# Altium schematic symbol library Altium_Library.SchLib: 822 symbols (part 16 of 17)
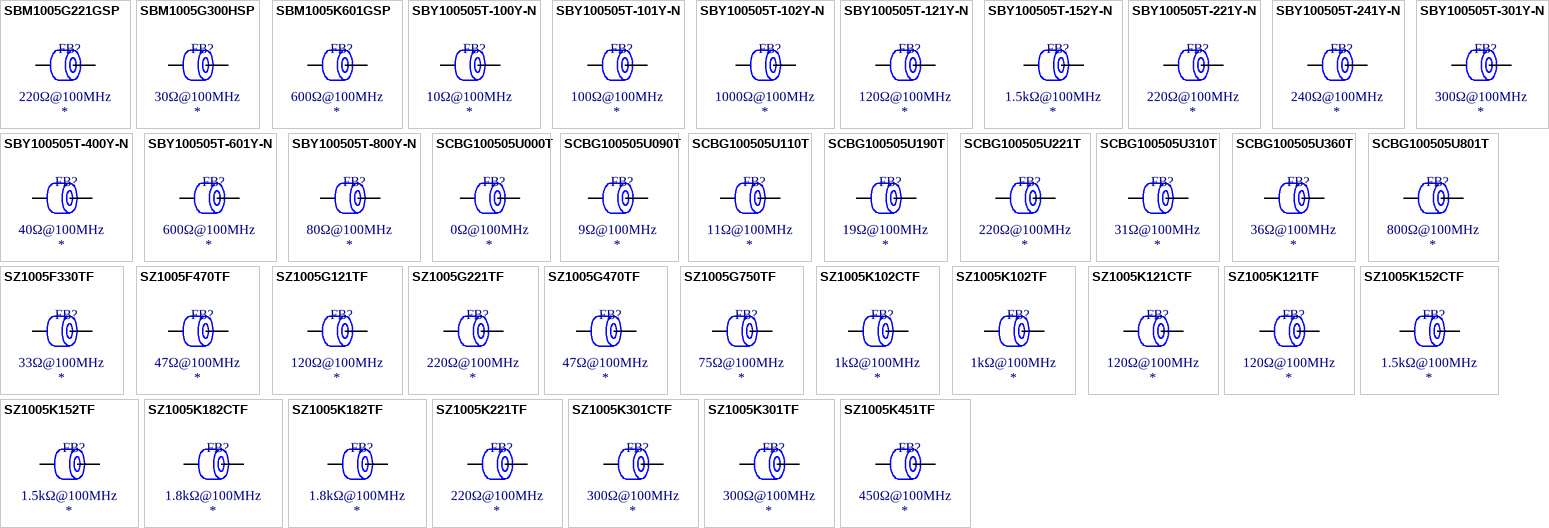
[diagram p35: symbols SBM1005G221GSP to SZ1005K451TF]

## SBM1005G300HSP
designator FB?  Impedance @ Frequency: 30Ω@100MHz
Ferrite, 30Ω@100MHz, ±25%, 150mΩ, 600mA, SMD 0402; Manufacturer: Sunltech Tech; Manufacturer Part Number: SBM1005G300HSP; Package Size: 0402; JLCPCB Basic Part: No; JLCPCB Part Number: C216123; Supplier 1: LCSC; Category: Ferrite Beads; Supplier Part Number 1: C216123; Tolerance: ±25%; Rated Current: 600mA; DC Resistance: 150mΩ; RoHS: Yes; ComponentLink1Description: Datasheet; ComponentLink1URL: https://wmsc.lcsc.com/wmsc/upload/file/pdf/v2/lcsc/2304140030_Sunltech-Tech-SBM1005G300HSP_C216123.pdf; ComponentLink2Description: JLCPCB Part URL; ComponentLink2URL: https://jlcpcb.com/partdetail/C216123; ComponentLink3Description: LCSC Part URL; ComponentLink3URL: https://lcsc.com/product-detail/Ferrite-Beads_Sunltech-Tech-Sunltech-Tech-SBM1005G300HSP_C216123.html
footprint FB-0402 (0402 (1005M) Ferrite)
pins: 1, 2

## SBM1005K601GSP
designator FB?  Impedance @ Frequency: 600Ω@100MHz
Ferrite, 600Ω@100MHz, ±25%, 1Ω, 500mA, SMD 0402; Manufacturer: Sunltech Tech; Manufacturer Part Number: SBM1005K601GSP; Package Size: 0402; JLCPCB Basic Part: No; JLCPCB Part Number: C216127; Supplier 1: LCSC; Category: Ferrite Beads; Supplier Part Number 1: C216127; Tolerance: ±25%; Rated Current: 500mA; DC Resistance: 1Ω; RoHS: Yes; ComponentLink1Description: Datasheet; ComponentLink1URL: https://wmsc.lcsc.com/wmsc/upload/file/pdf/v2/lcsc/2304140030_Sunltech-Tech-SBM1005K601GSP_C216127.pdf; ComponentLink2Description: JLCPCB Part URL; ComponentLink2URL: https://jlcpcb.com/partdetail/C216127; ComponentLink3Description: LCSC Part URL; ComponentLink3URL: https://lcsc.com/product-detail/Ferrite-Beads_Sunltech-Tech-Sunltech-Tech-SBM1005K601GSP_C216127.html
footprint FB-0402 (0402 (1005M) Ferrite)
pins: 1, 2

## SBY100505T-100Y-N
designator FB?  Impedance @ Frequency: 10Ω@100MHz
Ferrite, 10Ω@100MHz, ±25%, 0.05Ω, 500mA, SMD 0402; Manufacturer: Chilisin Elec; Manufacturer Part Number: SBY100505T-100Y-N; Package Size: 0402; JLCPCB Basic Part: No; JLCPCB Part Number: C285645; Supplier 1: LCSC; Category: Ferrite Beads; Supplier Part Number 1: C285645; Tolerance: ±25%; Rated Current: 500mA; DC Resistance: 0.05Ω; RoHS: Yes; ComponentLink1Description: Datasheet; ComponentLink1URL: https://wmsc.lcsc.com/wmsc/upload/file/pdf/v2/lcsc/2304140030_Chilisin-Elec-SBY100505T-100Y-N_C285645.pdf; ComponentLink2Description: JLCPCB Part URL; ComponentLink2URL: https://jlcpcb.com/partdetail/C285645; ComponentLink3Description: LCSC Part URL; ComponentLink3URL: https://lcsc.com/product-detail/Ferrite-Beads_Chilisin-Elec-Chilisin-Elec-SBY100505T-100Y-N_C285645.html
footprint FB-0402 (0402 (1005M) Ferrite)
pins: 1, 2

## SBY100505T-101Y-N
designator FB?  Impedance @ Frequency: 100Ω@100MHz
Ferrite, 100Ω@100MHz, ±25%, 0.25Ω, 500mA, SMD 0402; Manufacturer: Chilisin Elec; Manufacturer Part Number: SBY100505T-101Y-N; Package Size: 0402; JLCPCB Basic Part: No; JLCPCB Part Number: C280601; Supplier 1: LCSC; Category: Ferrite Beads; Supplier Part Number 1: C280601; Tolerance: ±25%; Rated Current: 500mA; DC Resistance: 0.25Ω; RoHS: Yes; ComponentLink1Description: Datasheet; ComponentLink1URL: https://wmsc.lcsc.com/wmsc/upload/file/pdf/v2/lcsc/2304140030_Chilisin-Elec-SBY100505T-101Y-N_C280601.pdf; ComponentLink2Description: JLCPCB Part URL; ComponentLink2URL: https://jlcpcb.com/partdetail/C280601; ComponentLink3Description: LCSC Part URL; ComponentLink3URL: https://lcsc.com/product-detail/Ferrite-Beads_Chilisin-Elec-Chilisin-Elec-SBY100505T-101Y-N_C280601.html
footprint FB-0402 (0402 (1005M) Ferrite)
pins: 1, 2

## SBY100505T-102Y-N
designator FB?  Impedance @ Frequency: 1000Ω@100MHz
Ferrite, 1000Ω@100MHz, ±25%, 0.65Ω, 300mA, SMD 0402; Manufacturer: Chilisin Elec; Manufacturer Part Number: SBY100505T-102Y-N; Package Size: 0402; JLCPCB Basic Part: No; JLCPCB Part Number: C280602; Supplier 1: LCSC; Category: Ferrite Beads; Supplier Part Number 1: C280602; Tolerance: ±25%; Rated Current: 300mA; DC Resistance: 0.65Ω; RoHS: Yes; ComponentLink1Description: Datasheet; ComponentLink1URL: https://wmsc.lcsc.com/wmsc/upload/file/pdf/v2/lcsc/1811141623_Chilisin-Elec-SBY100505T-102Y-N_C280602.pdf; ComponentLink2Description: JLCPCB Part URL; ComponentLink2URL: https://jlcpcb.com/partdetail/C280602; ComponentLink3Description: LCSC Part URL; ComponentLink3URL: https://lcsc.com/product-detail/Ferrite-Beads_Chilisin-Elec-Chilisin-Elec-SBY100505T-102Y-N_C280602.html
footprint FB-0402 (0402 (1005M) Ferrite)
pins: 1, 2

## SBY100505T-121Y-N
designator FB?  Impedance @ Frequency: 120Ω@100MHz
Ferrite, 120Ω@100MHz, ±25%, 0.25Ω, 500mA, SMD 0402; Manufacturer: Chilisin Elec; Manufacturer Part Number: SBY100505T-121Y-N; Package Size: 0402; JLCPCB Basic Part: No; JLCPCB Part Number: C142034; Supplier 1: LCSC; Category: Ferrite Beads; Supplier Part Number 1: C142034; Tolerance: ±25%; Rated Current: 500mA; DC Resistance: 0.25Ω; RoHS: Yes; ComponentLink1Description: Datasheet; ComponentLink1URL: https://wmsc.lcsc.com/wmsc/upload/file/pdf/v2/lcsc/2304140030_Chilisin-Elec-SBY100505T-121Y-N_C142034.pdf; ComponentLink2Description: JLCPCB Part URL; ComponentLink2URL: https://jlcpcb.com/partdetail/C142034; ComponentLink3Description: LCSC Part URL; ComponentLink3URL: https://lcsc.com/product-detail/Ferrite-Beads_Chilisin-Elec-Chilisin-Elec-SBY100505T-121Y-N_C142034.html
footprint FB-0402 (0402 (1005M) Ferrite)
pins: 1, 2

## SBY100505T-152Y-N
designator FB?  Impedance @ Frequency: 1.5kΩ@100MHz
Ferrite, 1.5kΩ@100MHz, ±25%, SMD 0402; Manufacturer: Chilisin Elec; Manufacturer Part Number: SBY100505T-152Y-N; Package Size: 0402; JLCPCB Basic Part: No; JLCPCB Part Number: C142033; Supplier 1: LCSC; Category: Ferrite Beads; Supplier Part Number 1: C142033; Tolerance: ±25%; RoHS: Yes; ComponentLink1Description: Datasheet; ComponentLink1URL: https://wmsc.lcsc.com/wmsc/upload/file/pdf/v2/lcsc/2304140030_Chilisin-Elec-SBY100505T-152Y-N_C142033.pdf; ComponentLink2Description: JLCPCB Part URL; ComponentLink2URL: https://jlcpcb.com/partdetail/C142033; ComponentLink3Description: LCSC Part URL; ComponentLink3URL: https://lcsc.com/product-detail/Ferrite-Beads_Chilisin-Elec-Chilisin-Elec-SBY100505T-152Y-N_C142033.html
footprint FB-0402 (0402 (1005M) Ferrite)
pins: 1, 2

## SBY100505T-221Y-N
designator FB?  Impedance @ Frequency: 220Ω@100MHz
Ferrite, 220Ω@100MHz, ±25%, 0.29Ω, 450mA, SMD 0402; Manufacturer: Chilisin Elec; Manufacturer Part Number: SBY100505T-221Y-N; Package Size: 0402; JLCPCB Basic Part: No; JLCPCB Part Number: C108307; Supplier 1: LCSC; Category: Ferrite Beads; Supplier Part Number 1: C108307; Tolerance: ±25%; Rated Current: 450mA; DC Resistance: 0.29Ω; RoHS: Yes; ComponentLink1Description: Datasheet; ComponentLink1URL: https://wmsc.lcsc.com/wmsc/upload/file/pdf/v2/lcsc/2304140030_Chilisin-Elec-SBY100505T-221Y-N_C108307.pdf; ComponentLink2Description: JLCPCB Part URL; ComponentLink2URL: https://jlcpcb.com/partdetail/C108307; ComponentLink3Description: LCSC Part URL; ComponentLink3URL: https://lcsc.com/product-detail/Ferrite-Beads_Chilisin-Elec-Chilisin-Elec-SBY100505T-221Y-N_C108307.html
footprint FB-0402 (0402 (1005M) Ferrite)
pins: 1, 2

## SBY100505T-241Y-N
designator FB?  Impedance @ Frequency: 240Ω@100MHz
Ferrite, 240Ω@100MHz, ±25%, 0.4Ω, 400mA, SMD 0402; Manufacturer: Chilisin Elec; Manufacturer Part Number: SBY100505T-241Y-N; Package Size: 0402; JLCPCB Basic Part: No; JLCPCB Part Number: C329646; Supplier 1: LCSC; Category: Ferrite Beads; Supplier Part Number 1: C329646; Tolerance: ±25%; Rated Current: 400mA; DC Resistance: 0.4Ω; RoHS: Yes; ComponentLink1Description: Datasheet; ComponentLink1URL: https://wmsc.lcsc.com/wmsc/upload/file/pdf/v2/lcsc/1912111437_Chilisin-Elec-SBY100505T-241Y-N_C329646.pdf; ComponentLink2Description: JLCPCB Part URL; ComponentLink2URL: https://jlcpcb.com/partdetail/C329646; ComponentLink3Description: LCSC Part URL; ComponentLink3URL: https://lcsc.com/product-detail/Ferrite-Beads_Chilisin-Elec-Chilisin-Elec-SBY100505T-241Y-N_C329646.html
footprint FB-0402 (0402 (1005M) Ferrite)
pins: 1, 2

## SBY100505T-301Y-N
designator FB?  Impedance @ Frequency: 300Ω@100MHz
Ferrite, 300Ω@100MHz, ±25%, 0.5Ω, 300mA, SMD 0402; Manufacturer: Chilisin Elec; Manufacturer Part Number: SBY100505T-301Y-N; Package Size: 0402; JLCPCB Basic Part: No; JLCPCB Part Number: C108308; Supplier 1: LCSC; Category: Ferrite Beads; Supplier Part Number 1: C108308; Tolerance: ±25%; Rated Current: 300mA; DC Resistance: 0.5Ω; RoHS: Yes; ComponentLink1Description: Datasheet; ComponentLink1URL: https://wmsc.lcsc.com/wmsc/upload/file/pdf/v2/lcsc/2304140030_Chilisin-Elec-SBY100505T-301Y-N_C108308.pdf; ComponentLink2Description: JLCPCB Part URL; ComponentLink2URL: https://jlcpcb.com/partdetail/C108308; ComponentLink3Description: LCSC Part URL; ComponentLink3URL: https://lcsc.com/product-detail/Ferrite-Beads_Chilisin-Elec-Chilisin-Elec-SBY100505T-301Y-N_C108308.html
footprint FB-0402 (0402 (1005M) Ferrite)
pins: 1, 2

## SBY100505T-400Y-N
designator FB?  Impedance @ Frequency: 40Ω@100MHz
Ferrite, 40Ω@100MHz, ±25%, 0.2Ω, 500mA, SMD 0402; Manufacturer: Chilisin Elec; Manufacturer Part Number: SBY100505T-400Y-N; Package Size: 0402; JLCPCB Basic Part: No; JLCPCB Part Number: C285643; Supplier 1: LCSC; Category: Ferrite Beads; Supplier Part Number 1: C285643; Tolerance: ±25%; Rated Current: 500mA; DC Resistance: 0.2Ω; RoHS: Yes; ComponentLink1Description: Datasheet; ComponentLink1URL: https://wmsc.lcsc.com/wmsc/upload/file/pdf/v2/lcsc/2304140030_Chilisin-Elec-SBY100505T-400Y-N_C285643.pdf; ComponentLink2Description: JLCPCB Part URL; ComponentLink2URL: https://jlcpcb.com/partdetail/C285643; ComponentLink3Description: LCSC Part URL; ComponentLink3URL: https://lcsc.com/product-detail/Ferrite-Beads_Chilisin-Elec-Chilisin-Elec-SBY100505T-400Y-N_C285643.html
footprint FB-0402 (0402 (1005M) Ferrite)
pins: 1, 2

## SBY100505T-601Y-N
designator FB?  Impedance @ Frequency: 600Ω@100MHz
Ferrite, 600Ω@100MHz, ±25%, 0.52Ω, 300mA, SMD 0402; Manufacturer: Chilisin Elec; Manufacturer Part Number: SBY100505T-601Y-N; Package Size: 0402; JLCPCB Basic Part: No; JLCPCB Part Number: C142031; Supplier 1: LCSC; Category: Ferrite Beads; Supplier Part Number 1: C142031; Tolerance: ±25%; Rated Current: 300mA; DC Resistance: 0.52Ω; RoHS: Yes; ComponentLink1Description: Datasheet; ComponentLink1URL: https://wmsc.lcsc.com/wmsc/upload/file/pdf/v2/lcsc/2304140030_Chilisin-Elec-SBY100505T-601Y-N_C142031.pdf; ComponentLink2Description: JLCPCB Part URL; ComponentLink2URL: https://jlcpcb.com/partdetail/C142031; ComponentLink3Description: LCSC Part URL; ComponentLink3URL: https://lcsc.com/product-detail/Ferrite-Beads_Chilisin-Elec-Chilisin-Elec-SBY100505T-601Y-N_C142031.html
footprint FB-0402 (0402 (1005M) Ferrite)
pins: 1, 2

## SBY100505T-800Y-N
designator FB?  Impedance @ Frequency: 80Ω@100MHz
Ferrite, 80Ω@100MHz, ±25%, 0.2Ω, 500mA, SMD 0402; Manufacturer: Chilisin Elec; Manufacturer Part Number: SBY100505T-800Y-N; Package Size: 0402; JLCPCB Basic Part: No; JLCPCB Part Number: C2913982; Supplier 1: LCSC; Category: Ferrite Beads; Supplier Part Number 1: C2913982; Tolerance: ±25%; Rated Current: 500mA; DC Resistance: 0.2Ω; RoHS: Yes; ComponentLink1Description: Datasheet; ComponentLink1URL: https://wmsc.lcsc.com/wmsc/upload/file/pdf/v2/lcsc/2111051730_Chilisin-Elec-SBY100505T-800Y-N_C2913982.pdf; ComponentLink2Description: JLCPCB Part URL; ComponentLink2URL: https://jlcpcb.com/partdetail/C2913982; ComponentLink3Description: LCSC Part URL; ComponentLink3URL: https://lcsc.com/product-detail/Ferrite-Beads_Chilisin-Elec-Chilisin-Elec-SBY100505T-800Y-N_C2913982.html
footprint FB-0402 (0402 (1005M) Ferrite)
pins: 1, 2

## SCBG100505U000T
designator FB?  Impedance @ Frequency: 0Ω@100MHz
Ferrite, 0Ω@100MHz, 100mΩ, 300mA, SMD 0402; Manufacturer: Yanchuang; Manufacturer Part Number: SCBG100505U000T; Package Size: 0402; JLCPCB Basic Part: No; JLCPCB Part Number: C480820; Supplier 1: LCSC; Category: Ferrite Beads; Supplier Part Number 1: C480820; Rated Current: 300mA; DC Resistance: 100mΩ; RoHS: Yes; ComponentLink1Description: Datasheet; ComponentLink1URL: https://wmsc.lcsc.com/wmsc/upload/file/pdf/v2/lcsc/2304140030_Yanchuang-SCBG100505U000T_C480820.pdf; ComponentLink2Description: JLCPCB Part URL; ComponentLink2URL: https://jlcpcb.com/partdetail/C480820; ComponentLink3Description: LCSC Part URL; ComponentLink3URL: https://lcsc.com/product-detail/Ferrite-Beads_Yanchuang-Yanchuang-SCBG100505U000T_C480820.html
footprint FB-0402 (0402 (1005M) Ferrite)
pins: 1, 2

## SCBG100505U090T
designator FB?  Impedance @ Frequency: 9Ω@100MHz
Ferrite, 9Ω@100MHz, 100mΩ, 300mA, SMD 0402; Manufacturer: Yanchuang; Manufacturer Part Number: SCBG100505U090T; Package Size: 0402; JLCPCB Basic Part: No; JLCPCB Part Number: C480823; Supplier 1: LCSC; Category: Ferrite Beads; Supplier Part Number 1: C480823; Rated Current: 300mA; DC Resistance: 100mΩ; RoHS: Yes; ComponentLink1Description: Datasheet; ComponentLink1URL: https://wmsc.lcsc.com/wmsc/upload/file/pdf/v2/lcsc/2304140030_Yanchuang-SCBG100505U090T_C480823.pdf; ComponentLink2Description: JLCPCB Part URL; ComponentLink2URL: https://jlcpcb.com/partdetail/C480823; ComponentLink3Description: LCSC Part URL; ComponentLink3URL: https://lcsc.com/product-detail/Ferrite-Beads_Yanchuang-Yanchuang-SCBG100505U090T_C480823.html
footprint FB-0402 (0402 (1005M) Ferrite)
pins: 1, 2

## SCBG100505U110T
designator FB?  Impedance @ Frequency: 11Ω@100MHz
Ferrite, 11Ω@100MHz, 100mΩ, 300mA, SMD 0402; Manufacturer: Yanchuang; Manufacturer Part Number: SCBG100505U110T; Package Size: 0402; JLCPCB Basic Part: No; JLCPCB Part Number: C480824; Supplier 1: LCSC; Category: Ferrite Beads; Supplier Part Number 1: C480824; Rated Current: 300mA; DC Resistance: 100mΩ; RoHS: Yes; ComponentLink1Description: Datasheet; ComponentLink1URL: https://wmsc.lcsc.com/wmsc/upload/file/pdf/v2/lcsc/2304140030_Yanchuang-SCBG100505U110T_C480824.pdf; ComponentLink2Description: JLCPCB Part URL; ComponentLink2URL: https://jlcpcb.com/partdetail/C480824; ComponentLink3Description: LCSC Part URL; ComponentLink3URL: https://lcsc.com/product-detail/Ferrite-Beads_Yanchuang-Yanchuang-SCBG100505U110T_C480824.html
footprint FB-0402 (0402 (1005M) Ferrite)
pins: 1, 2

## SCBG100505U190T
designator FB?  Impedance @ Frequency: 19Ω@100MHz
Ferrite, 19Ω@100MHz, 100mΩ, 300mA, SMD 0402; Manufacturer: Yanchuang; Manufacturer Part Number: SCBG100505U190T; Package Size: 0402; JLCPCB Basic Part: No; JLCPCB Part Number: C480826; Supplier 1: LCSC; Category: Ferrite Beads; Supplier Part Number 1: C480826; Rated Current: 300mA; DC Resistance: 100mΩ; RoHS: Yes; ComponentLink1Description: Datasheet; ComponentLink1URL: https://wmsc.lcsc.com/wmsc/upload/file/pdf/v2/lcsc/2304140030_Yanchuang-SCBG100505U190T_C480826.pdf; ComponentLink2Description: JLCPCB Part URL; ComponentLink2URL: https://jlcpcb.com/partdetail/C480826; ComponentLink3Description: LCSC Part URL; ComponentLink3URL: https://lcsc.com/product-detail/Ferrite-Beads_Yanchuang-Yanchuang-SCBG100505U190T_C480826.html
footprint FB-0402 (0402 (1005M) Ferrite)
pins: 1, 2

## SCBG100505U221T
designator FB?  Impedance @ Frequency: 220Ω@100MHz
Ferrite, 220Ω@100MHz, ±25%, 700mΩ, 100mA, SMD 0402; Manufacturer: Yanchuang; Manufacturer Part Number: SCBG100505U221T; Package Size: 0402; JLCPCB Basic Part: No; JLCPCB Part Number: C480835; Supplier 1: LCSC; Category: Ferrite Beads; Supplier Part Number 1: C480835; Tolerance: ±25%; Rated Current: 100mA; DC Resistance: 700mΩ; RoHS: Yes; ComponentLink1Description: Datasheet; ComponentLink1URL: https://wmsc.lcsc.com/wmsc/upload/file/pdf/v2/lcsc/2304140030_Yanchuang-SCBG100505U221T_C480835.pdf; ComponentLink2Description: JLCPCB Part URL; ComponentLink2URL: https://jlcpcb.com/partdetail/C480835; ComponentLink3Description: LCSC Part URL; ComponentLink3URL: https://lcsc.com/product-detail/Ferrite-Beads_Yanchuang-Yanchuang-SCBG100505U221T_C480835.html
footprint FB-0402 (0402 (1005M) Ferrite)
pins: 1, 2

## SCBG100505U310T
designator FB?  Impedance @ Frequency: 31Ω@100MHz
Ferrite, 31Ω@100MHz, ±25%, 200mΩ, 300mA, SMD 0402; Manufacturer: Yanchuang; Manufacturer Part Number: SCBG100505U310T; Package Size: 0402; JLCPCB Basic Part: No; JLCPCB Part Number: C480828; Supplier 1: LCSC; Category: Ferrite Beads; Supplier Part Number 1: C480828; Tolerance: ±25%; Rated Current: 300mA; DC Resistance: 200mΩ; RoHS: Yes; ComponentLink1Description: Datasheet; ComponentLink1URL: https://wmsc.lcsc.com/wmsc/upload/file/pdf/v2/lcsc/2304140030_Yanchuang-SCBG100505U310T_C480828.pdf; ComponentLink2Description: JLCPCB Part URL; ComponentLink2URL: https://jlcpcb.com/partdetail/C480828; ComponentLink3Description: LCSC Part URL; ComponentLink3URL: https://lcsc.com/product-detail/Ferrite-Beads_Yanchuang-Yanchuang-SCBG100505U310T_C480828.html
footprint FB-0402 (0402 (1005M) Ferrite)
pins: 1, 2

## SCBG100505U360T
designator FB?  Impedance @ Frequency: 36Ω@100MHz
Ferrite, 36Ω@100MHz, ±25%, 200mΩ, 300mA, SMD 0402; Manufacturer: Yanchuang; Manufacturer Part Number: SCBG100505U360T; Package Size: 0402; JLCPCB Basic Part: No; JLCPCB Part Number: C480829; Supplier 1: LCSC; Category: Ferrite Beads; Supplier Part Number 1: C480829; Tolerance: ±25%; Rated Current: 300mA; DC Resistance: 200mΩ; RoHS: Yes; ComponentLink1Description: Datasheet; ComponentLink1URL: https://wmsc.lcsc.com/wmsc/upload/file/pdf/v2/lcsc/2304140030_Yanchuang-SCBG100505U360T_C480829.pdf; ComponentLink2Description: JLCPCB Part URL; ComponentLink2URL: https://jlcpcb.com/partdetail/C480829; ComponentLink3Description: LCSC Part URL; ComponentLink3URL: https://lcsc.com/product-detail/Ferrite-Beads_Yanchuang-Yanchuang-SCBG100505U360T_C480829.html
footprint FB-0402 (0402 (1005M) Ferrite)
pins: 1, 2

## SCBG100505U801T
designator FB?  Impedance @ Frequency: 800Ω@100MHz
Ferrite, 800Ω@100MHz, ±25%, 1.4Ω, 50mA, SMD 0402; Manufacturer: Yanchuang; Manufacturer Part Number: SCBG100505U801T; Package Size: 0402; JLCPCB Basic Part: No; JLCPCB Part Number: C480839; Supplier 1: LCSC; Category: Ferrite Beads; Supplier Part Number 1: C480839; Tolerance: ±25%; Rated Current: 50mA; DC Resistance: 1.4Ω; RoHS: Yes; ComponentLink1Description: Datasheet; ComponentLink1URL: https://wmsc.lcsc.com/wmsc/upload/file/pdf/v2/lcsc/2304140030_Yanchuang-SCBG100505U801T_C480839.pdf; ComponentLink2Description: JLCPCB Part URL; ComponentLink2URL: https://jlcpcb.com/partdetail/C480839; ComponentLink3Description: LCSC Part URL; ComponentLink3URL: https://lcsc.com/product-detail/Ferrite-Beads_Yanchuang-Yanchuang-SCBG100505U801T_C480839.html
footprint FB-0402 (0402 (1005M) Ferrite)
pins: 1, 2

## SZ1005F330TF
designator FB?  Impedance @ Frequency: 33Ω@100MHz
Ferrite, 33Ω@100MHz, ±25%, 400mΩ, 300mA, SMD 0402; Manufacturer: Sunlord; Manufacturer Part Number: SZ1005F330TF; Package Size: 0402; JLCPCB Basic Part: No; JLCPCB Part Number: C96979; Supplier 1: LCSC; Category: Ferrite Beads; Supplier Part Number 1: C96979; Tolerance: ±25%; Rated Current: 300mA; DC Resistance: 400mΩ; RoHS: Yes; ComponentLink1Description: Datasheet; ComponentLink1URL: https://wmsc.lcsc.com/wmsc/upload/file/pdf/v2/lcsc/2310301641_Sunlord-SZ1005F330TF_C96979.pdf; ComponentLink2Description: JLCPCB Part URL; ComponentLink2URL: https://jlcpcb.com/partdetail/C96979; ComponentLink3Description: LCSC Part URL; ComponentLink3URL: https://lcsc.com/product-detail/Ferrite-Beads_Sunlord-Sunlord-SZ1005F330TF_C96979.html
footprint FB-0402 (0402 (1005M) Ferrite)
pins: 1, 2

## SZ1005F470TF
designator FB?  Impedance @ Frequency: 47Ω@100MHz
Ferrite, 47Ω@100MHz, ±25%, 600mΩ, 200mA, SMD 0402; Manufacturer: Sunlord; Manufacturer Part Number: SZ1005F470TF; Package Size: 0402; JLCPCB Basic Part: No; JLCPCB Part Number: C92628; Supplier 1: LCSC; Category: Ferrite Beads; Supplier Part Number 1: C92628; Tolerance: ±25%; Rated Current: 200mA; DC Resistance: 600mΩ; RoHS: Yes; ComponentLink1Description: Datasheet; ComponentLink1URL: https://wmsc.lcsc.com/wmsc/upload/file/pdf/v2/lcsc/2310301641_Sunlord-SZ1005F470TF_C92628.pdf; ComponentLink2Description: JLCPCB Part URL; ComponentLink2URL: https://jlcpcb.com/partdetail/C92628; ComponentLink3Description: LCSC Part URL; ComponentLink3URL: https://lcsc.com/product-detail/Ferrite-Beads_Sunlord-Sunlord-SZ1005F470TF_C92628.html
footprint FB-0402 (0402 (1005M) Ferrite)
pins: 1, 2

## SZ1005G121TF
designator FB?  Impedance @ Frequency: 120Ω@100MHz
Ferrite, 120Ω@100MHz, ±25%, 400mΩ, 400mA, SMD 0402; Manufacturer: Sunlord; Manufacturer Part Number: SZ1005G121TF; Package Size: 0402; JLCPCB Basic Part: No; JLCPCB Part Number: C96980; Supplier 1: LCSC; Category: Ferrite Beads; Supplier Part Number 1: C96980; Tolerance: ±25%; Rated Current: 400mA; DC Resistance: 400mΩ; RoHS: Yes; ComponentLink1Description: Datasheet; ComponentLink1URL: https://wmsc.lcsc.com/wmsc/upload/file/pdf/v2/lcsc/2310301641_Sunlord-SZ1005G121TF_C96980.pdf; ComponentLink2Description: JLCPCB Part URL; ComponentLink2URL: https://jlcpcb.com/partdetail/C96980; ComponentLink3Description: LCSC Part URL; ComponentLink3URL: https://lcsc.com/product-detail/Ferrite-Beads_Sunlord-Sunlord-SZ1005G121TF_C96980.html
footprint FB-0402 (0402 (1005M) Ferrite)
pins: 1, 2

## SZ1005G221TF
designator FB?  Impedance @ Frequency: 220Ω@100MHz
Ferrite, 220Ω@100MHz, ±25%, 700mΩ, 200mA, SMD 0402; Manufacturer: Sunlord; Manufacturer Part Number: SZ1005G221TF; Package Size: 0402; JLCPCB Basic Part: No; JLCPCB Part Number: C96981; Supplier 1: LCSC; Category: Ferrite Beads; Supplier Part Number 1: C96981; Tolerance: ±25%; Rated Current: 200mA; DC Resistance: 700mΩ; RoHS: Yes; ComponentLink1Description: Datasheet; ComponentLink1URL: https://wmsc.lcsc.com/wmsc/upload/file/pdf/v2/lcsc/2310301641_Sunlord-SZ1005G221TF_C96981.pdf; ComponentLink2Description: JLCPCB Part URL; ComponentLink2URL: https://jlcpcb.com/partdetail/C96981; ComponentLink3Description: LCSC Part URL; ComponentLink3URL: https://lcsc.com/product-detail/Ferrite-Beads_Sunlord-Sunlord-SZ1005G221TF_C96981.html
footprint FB-0402 (0402 (1005M) Ferrite)
pins: 1, 2

## SZ1005G470TF
designator FB?  Impedance @ Frequency: 47Ω@100MHz
Ferrite, 47Ω@100MHz, ±25%, SMD 0402; Manufacturer: Sunlord; Manufacturer Part Number: SZ1005G470TF; Package Size: 0402; JLCPCB Basic Part: No; JLCPCB Part Number: C370546; Supplier 1: LCSC; Category: Ferrite Beads; Supplier Part Number 1: C370546; Tolerance: ±25%; RoHS: Yes; ComponentLink1Description: Datasheet; ComponentLink1URL: https://wmsc.lcsc.com/wmsc/upload/file/pdf/v2/lcsc/2310301641_Sunlord-SZ1005G470TF_C370546.pdf; ComponentLink2Description: JLCPCB Part URL; ComponentLink2URL: https://jlcpcb.com/partdetail/C370546; ComponentLink3Description: LCSC Part URL; ComponentLink3URL: https://lcsc.com/product-detail/Ferrite-Beads_Sunlord-Sunlord-SZ1005G470TF_C370546.html
footprint FB-0402 (0402 (1005M) Ferrite)
pins: 1, 2

## SZ1005G750TF
designator FB?  Impedance @ Frequency: 75Ω@100MHz
Ferrite, 75Ω@100MHz, ±25%, 300mΩ, 600mA, SMD 0402; Manufacturer: Sunlord; Manufacturer Part Number: SZ1005G750TF; Package Size: 0402; JLCPCB Basic Part: No; JLCPCB Part Number: C98274; Supplier 1: LCSC; Category: Ferrite Beads; Supplier Part Number 1: C98274; Tolerance: ±25%; Rated Current: 600mA; DC Resistance: 300mΩ; RoHS: Yes; ComponentLink1Description: Datasheet; ComponentLink1URL: https://wmsc.lcsc.com/wmsc/upload/file/pdf/v2/lcsc/2310301641_Sunlord-SZ1005G750TF_C98274.pdf; ComponentLink2Description: JLCPCB Part URL; ComponentLink2URL: https://jlcpcb.com/partdetail/C98274; ComponentLink3Description: LCSC Part URL; ComponentLink3URL: https://lcsc.com/product-detail/Ferrite-Beads_Sunlord-Sunlord-SZ1005G750TF_C98274.html
footprint FB-0402 (0402 (1005M) Ferrite)
pins: 1, 2

## SZ1005K102CTF
designator FB?  Impedance @ Frequency: 1kΩ@100MHz
Ferrite, 1kΩ@100MHz, ±25%, 900mΩ, 200mA, SMD 0402; Manufacturer: Sunlord; Manufacturer Part Number: SZ1005K102CTF; Package Size: 0402; JLCPCB Basic Part: No; JLCPCB Part Number: C316348; Supplier 1: LCSC; Category: Ferrite Beads; Supplier Part Number 1: C316348; Tolerance: ±25%; Rated Current: 200mA; DC Resistance: 900mΩ; RoHS: Yes; ComponentLink1Description: Datasheet; ComponentLink1URL: https://wmsc.lcsc.com/wmsc/upload/file/pdf/v2/lcsc/2310301641_Sunlord-SZ1005K102CTF_C316348.pdf; ComponentLink2Description: JLCPCB Part URL; ComponentLink2URL: https://jlcpcb.com/partdetail/C316348; ComponentLink3Description: LCSC Part URL; ComponentLink3URL: https://lcsc.com/product-detail/Ferrite-Beads_Sunlord-Sunlord-SZ1005K102CTF_C316348.html
footprint FB-0402 (0402 (1005M) Ferrite)
pins: 1, 2

## SZ1005K102TF
designator FB?  Impedance @ Frequency: 1kΩ@100MHz
Ferrite, 1kΩ@100MHz, ±25%, 1.2Ω, 100mA, SMD 0402; Manufacturer: Sunlord; Manufacturer Part Number: SZ1005K102TF; Package Size: 0402; JLCPCB Basic Part: No; JLCPCB Part Number: C92630; Supplier 1: LCSC; Category: Ferrite Beads; Supplier Part Number 1: C92630; Tolerance: ±25%; Rated Current: 100mA; DC Resistance: 1.2Ω; RoHS: Yes; ComponentLink1Description: Datasheet; ComponentLink1URL: https://wmsc.lcsc.com/wmsc/upload/file/pdf/v2/lcsc/2310301641_Sunlord-SZ1005K102TF_C92630.pdf; ComponentLink2Description: JLCPCB Part URL; ComponentLink2URL: https://jlcpcb.com/partdetail/C92630; ComponentLink3Description: LCSC Part URL; ComponentLink3URL: https://lcsc.com/product-detail/Ferrite-Beads_Sunlord-Sunlord-SZ1005K102TF_C92630.html
footprint FB-0402 (0402 (1005M) Ferrite)
pins: 1, 2

## SZ1005K121CTF
designator FB?  Impedance @ Frequency: 120Ω@100MHz
Ferrite, 120Ω@100MHz, ±25%, 400mΩ, SMD 0402; Manufacturer: Sunlord; Manufacturer Part Number: SZ1005K121CTF; Package Size: 0402; JLCPCB Basic Part: No; JLCPCB Part Number: C92627; Supplier 1: LCSC; Category: Ferrite Beads; Supplier Part Number 1: C92627; Tolerance: ±25%; DC Resistance: 400mΩ; RoHS: Yes; ComponentLink1Description: Datasheet; ComponentLink1URL: https://wmsc.lcsc.com/wmsc/upload/file/pdf/v2/lcsc/2310301641_Sunlord-SZ1005K121CTF_C92627.pdf; ComponentLink2Description: JLCPCB Part URL; ComponentLink2URL: https://jlcpcb.com/partdetail/C92627; ComponentLink3Description: LCSC Part URL; ComponentLink3URL: https://lcsc.com/product-detail/Ferrite-Beads_Sunlord-Sunlord-SZ1005K121CTF_C92627.html
footprint FB-0402 (0402 (1005M) Ferrite)
pins: 1, 2

## SZ1005K121TF
designator FB?  Impedance @ Frequency: 120Ω@100MHz
Ferrite, 120Ω@100MHz, ±25%, 400mΩ, 400mA, SMD 0402; Manufacturer: Sunlord; Manufacturer Part Number: SZ1005K121TF; Package Size: 0402; JLCPCB Basic Part: No; JLCPCB Part Number: C96983; Supplier 1: LCSC; Category: Ferrite Beads; Supplier Part Number 1: C96983; Tolerance: ±25%; Rated Current: 400mA; DC Resistance: 400mΩ; RoHS: Yes; ComponentLink1Description: Datasheet; ComponentLink1URL: https://wmsc.lcsc.com/wmsc/upload/file/pdf/v2/lcsc/2310301641_Sunlord-SZ1005K121TF_C96983.pdf; ComponentLink2Description: JLCPCB Part URL; ComponentLink2URL: https://jlcpcb.com/partdetail/C96983; ComponentLink3Description: LCSC Part URL; ComponentLink3URL: https://lcsc.com/product-detail/Ferrite-Beads_Sunlord-Sunlord-SZ1005K121TF_C96983.html
footprint FB-0402 (0402 (1005M) Ferrite)
pins: 1, 2

## SZ1005K152CTF
designator FB?  Impedance @ Frequency: 1.5kΩ@100MHz
Ferrite, 1.5kΩ@100MHz, ±25%, 1.2Ω, 100mA, SMD 0402; Manufacturer: Sunlord; Manufacturer Part Number: SZ1005K152CTF; Package Size: 0402; JLCPCB Basic Part: No; JLCPCB Part Number: C370547; Supplier 1: LCSC; Category: Ferrite Beads; Supplier Part Number 1: C370547; Tolerance: ±25%; Rated Current: 100mA; DC Resistance: 1.2Ω; RoHS: Yes; ComponentLink1Description: Datasheet; ComponentLink1URL: https://wmsc.lcsc.com/wmsc/upload/file/pdf/v2/lcsc/2310301641_Sunlord-SZ1005K152CTF_C370547.pdf; ComponentLink2Description: JLCPCB Part URL; ComponentLink2URL: https://jlcpcb.com/partdetail/C370547; ComponentLink3Description: LCSC Part URL; ComponentLink3URL: https://lcsc.com/product-detail/Ferrite-Beads_Sunlord-Sunlord-SZ1005K152CTF_C370547.html
footprint FB-0402 (0402 (1005M) Ferrite)
pins: 1, 2

## SZ1005K152TF
designator FB?  Impedance @ Frequency: 1.5kΩ@100MHz
Ferrite, 1.5kΩ@100MHz, ±25%, 1.4Ω, 100mA, SMD 0402; Manufacturer: Sunlord; Manufacturer Part Number: SZ1005K152TF; Package Size: 0402; JLCPCB Basic Part: No; JLCPCB Part Number: C98276; Supplier 1: LCSC; Category: Ferrite Beads; Supplier Part Number 1: C98276; Tolerance: ±25%; Rated Current: 100mA; DC Resistance: 1.4Ω; RoHS: Yes; ComponentLink1Description: Datasheet; ComponentLink1URL: https://wmsc.lcsc.com/wmsc/upload/file/pdf/v2/lcsc/2310301641_Sunlord-SZ1005K152TF_C98276.pdf; ComponentLink2Description: JLCPCB Part URL; ComponentLink2URL: https://jlcpcb.com/partdetail/C98276; ComponentLink3Description: LCSC Part URL; ComponentLink3URL: https://lcsc.com/product-detail/Ferrite-Beads_Sunlord-Sunlord-SZ1005K152TF_C98276.html
footprint FB-0402 (0402 (1005M) Ferrite)
pins: 1, 2

## SZ1005K182CTF
designator FB?  Impedance @ Frequency: 1.8kΩ@100MHz
Ferrite, 1.8kΩ@100MHz, ±25%, 1.4Ω, 100mA, SMD 0402; Manufacturer: Sunlord; Manufacturer Part Number: SZ1005K182CTF; Package Size: 0402; JLCPCB Basic Part: No; JLCPCB Part Number: C279973; Supplier 1: LCSC; Category: Ferrite Beads; Supplier Part Number 1: C279973; Tolerance: ±25%; Rated Current: 100mA; DC Resistance: 1.4Ω; RoHS: Yes; ComponentLink1Description: Datasheet; ComponentLink1URL: https://wmsc.lcsc.com/wmsc/upload/file/pdf/v2/lcsc/2310301641_Sunlord-SZ1005K182CTF_C279973.pdf; ComponentLink2Description: JLCPCB Part URL; ComponentLink2URL: https://jlcpcb.com/partdetail/C279973; ComponentLink3Description: LCSC Part URL; ComponentLink3URL: https://lcsc.com/product-detail/Ferrite-Beads_Sunlord-Sunlord-SZ1005K182CTF_C279973.html
footprint FB-0402 (0402 (1005M) Ferrite)
pins: 1, 2

## SZ1005K182TF
designator FB?  Impedance @ Frequency: 1.8kΩ@100MHz
Ferrite, 1.8kΩ@100MHz, ±25%, 1.8Ω, 50mA, SMD 0402; Manufacturer: Sunlord; Manufacturer Part Number: SZ1005K182TF; Package Size: 0402; JLCPCB Basic Part: No; JLCPCB Part Number: C89917; Supplier 1: LCSC; Category: Ferrite Beads; Supplier Part Number 1: C89917; Tolerance: ±25%; Rated Current: 50mA; DC Resistance: 1.8Ω; RoHS: Yes; ComponentLink1Description: Datasheet; ComponentLink1URL: https://wmsc.lcsc.com/wmsc/upload/file/pdf/v2/lcsc/2310301641_Sunlord-SZ1005K182TF_C89917.pdf; ComponentLink2Description: JLCPCB Part URL; ComponentLink2URL: https://jlcpcb.com/partdetail/C89917; ComponentLink3Description: LCSC Part URL; ComponentLink3URL: https://lcsc.com/product-detail/Ferrite-Beads_Sunlord-Sunlord-SZ1005K182TF_C89917.html
footprint FB-0402 (0402 (1005M) Ferrite)
pins: 1, 2

## SZ1005K221TF
designator FB?  Impedance @ Frequency: 220Ω@100MHz
Ferrite, 220Ω@100MHz, ±25%, 700mΩ, 200mA, SMD 0402; Manufacturer: Sunlord; Manufacturer Part Number: SZ1005K221TF; Package Size: 0402; JLCPCB Basic Part: No; JLCPCB Part Number: C96984; Supplier 1: LCSC; Category: Ferrite Beads; Supplier Part Number 1: C96984; Tolerance: ±25%; Rated Current: 200mA; DC Resistance: 700mΩ; RoHS: Yes; ComponentLink1Description: Datasheet; ComponentLink1URL: https://wmsc.lcsc.com/wmsc/upload/file/pdf/v2/lcsc/2310301641_Sunlord-SZ1005K221TF_C96984.pdf; ComponentLink2Description: JLCPCB Part URL; ComponentLink2URL: https://jlcpcb.com/partdetail/C96984; ComponentLink3Description: LCSC Part URL; ComponentLink3URL: https://lcsc.com/product-detail/Ferrite-Beads_Sunlord-Sunlord-SZ1005K221TF_C96984.html
footprint FB-0402 (0402 (1005M) Ferrite)
pins: 1, 2

## SZ1005K301CTF
designator FB?  Impedance @ Frequency: 300Ω@100MHz
Ferrite, 300Ω@100MHz, ±25%, 800mΩ, SMD 0402; Manufacturer: Sunlord; Manufacturer Part Number: SZ1005K301CTF; Package Size: 0402; JLCPCB Basic Part: No; JLCPCB Part Number: C316347; Supplier 1: LCSC; Category: Ferrite Beads; Supplier Part Number 1: C316347; Tolerance: ±25%; DC Resistance: 800mΩ; RoHS: Yes; ComponentLink1Description: Datasheet; ComponentLink1URL: https://wmsc.lcsc.com/wmsc/upload/file/pdf/v2/lcsc/2310301641_Sunlord-SZ1005K301CTF_C316347.pdf; ComponentLink2Description: JLCPCB Part URL; ComponentLink2URL: https://jlcpcb.com/partdetail/C316347; ComponentLink3Description: LCSC Part URL; ComponentLink3URL: https://lcsc.com/product-detail/Ferrite-Beads_Sunlord-Sunlord-SZ1005K301CTF_C316347.html
footprint FB-0402 (0402 (1005M) Ferrite)
pins: 1, 2

## SZ1005K301TF
designator FB?  Impedance @ Frequency: 300Ω@100MHz
Ferrite, 300Ω@100MHz, ±25%, 800mΩ, 200mA, SMD 0402; Manufacturer: Sunlord; Manufacturer Part Number: SZ1005K301TF; Package Size: 0402; JLCPCB Basic Part: No; JLCPCB Part Number: C98275; Supplier 1: LCSC; Category: Ferrite Beads; Supplier Part Number 1: C98275; Tolerance: ±25%; Rated Current: 200mA; DC Resistance: 800mΩ; RoHS: Yes; ComponentLink1Description: Datasheet; ComponentLink1URL: https://wmsc.lcsc.com/wmsc/upload/file/pdf/v2/lcsc/2310301641_Sunlord-SZ1005K301TF_C98275.pdf; ComponentLink2Description: JLCPCB Part URL; ComponentLink2URL: https://jlcpcb.com/partdetail/C98275; ComponentLink3Description: LCSC Part URL; ComponentLink3URL: https://lcsc.com/product-detail/Ferrite-Beads_Sunlord-Sunlord-SZ1005K301TF_C98275.html
footprint FB-0402 (0402 (1005M) Ferrite)
pins: 1, 2

## SZ1005K451TF
designator FB?  Impedance @ Frequency: 450Ω@100MHz
Ferrite, 450Ω@100MHz, ±25%, SMD 0402; Manufacturer: Sunlord; Manufacturer Part Number: SZ1005K451TF; Package Size: 0402; JLCPCB Basic Part: No; JLCPCB Part Number: C882643; Supplier 1: LCSC; Category: Ferrite Beads; Supplier Part Number 1: C882643; Tolerance: ±25%; RoHS: Yes; ComponentLink1Description: Datasheet; ComponentLink1URL: https://wmsc.lcsc.com/wmsc/upload/file/pdf/v2/lcsc/2310301641_Sunlord-SZ1005K451TF_C882643.pdf; ComponentLink2Description: JLCPCB Part URL; ComponentLink2URL: https://jlcpcb.com/partdetail/C882643; ComponentLink3Description: LCSC Part URL; ComponentLink3URL: https://lcsc.com/product-detail/Ferrite-Beads_Sunlord-Sunlord-SZ1005K451TF_C882643.html
footprint FB-0402 (0402 (1005M) Ferrite)
pins: 1, 2

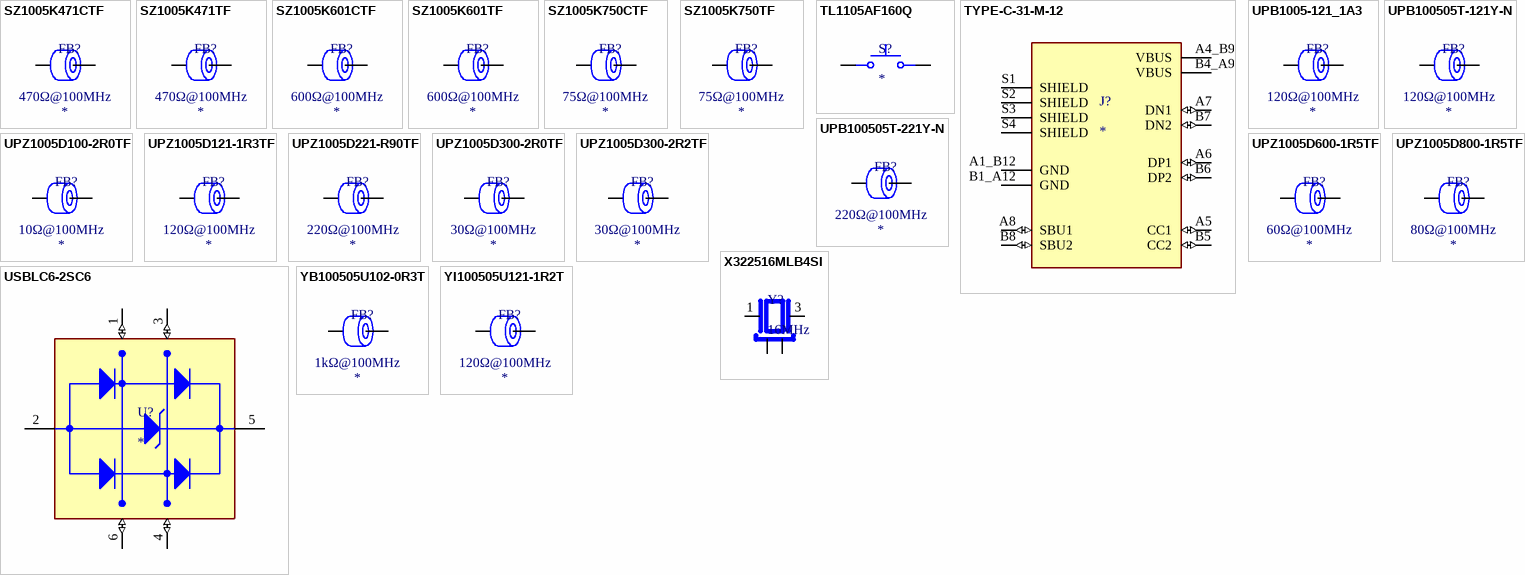
[diagram p20: symbols SZ1005K471CTF to YI100505U121-1R2T]

## SZ1005K471CTF
designator FB?  Impedance @ Frequency: 470Ω@100MHz
Ferrite, 470Ω@100MHz, ±25%, 600mΩ, SMD 0402; Manufacturer: Sunlord; Manufacturer Part Number: SZ1005K471CTF; Package Size: 0402; JLCPCB Basic Part: No; JLCPCB Part Number: C919156; Supplier 1: LCSC; Category: Ferrite Beads; Supplier Part Number 1: C919156; Tolerance: ±25%; DC Resistance: 600mΩ; RoHS: Yes; ComponentLink1Description: Datasheet; ComponentLink1URL: https://wmsc.lcsc.com/wmsc/upload/file/pdf/v2/lcsc/2310301641_Sunlord-SZ1005K471CTF_C919156.pdf; ComponentLink2Description: JLCPCB Part URL; ComponentLink2URL: https://jlcpcb.com/partdetail/C919156; ComponentLink3Description: LCSC Part URL; ComponentLink3URL: https://lcsc.com/product-detail/Ferrite-Beads_Sunlord-Sunlord-SZ1005K471CTF_C919156.html
footprint FB-0402 (0402 (1005M) Ferrite)
pins: 1, 2

## SZ1005K471TF
designator FB?  Impedance @ Frequency: 470Ω@100MHz
Ferrite, 470Ω@100MHz, ±25%, SMD 0402; Manufacturer: Sunlord; Manufacturer Part Number: SZ1005K471TF; Package Size: 0402; JLCPCB Basic Part: No; JLCPCB Part Number: C92629; Supplier 1: LCSC; Category: Ferrite Beads; Supplier Part Number 1: C92629; Tolerance: ±25%; RoHS: Yes; ComponentLink1Description: Datasheet; ComponentLink1URL: https://wmsc.lcsc.com/wmsc/upload/file/pdf/v2/lcsc/2310301641_Sunlord-SZ1005K471TF_C92629.pdf; ComponentLink2Description: JLCPCB Part URL; ComponentLink2URL: https://jlcpcb.com/partdetail/C92629; ComponentLink3Description: LCSC Part URL; ComponentLink3URL: https://lcsc.com/product-detail/Ferrite-Beads_Sunlord-Sunlord-SZ1005K471TF_C92629.html
footprint FB-0402 (0402 (1005M) Ferrite)
pins: 1, 2

## SZ1005K601CTF
designator FB?  Impedance @ Frequency: 600Ω@100MHz
Ferrite, 600Ω@100MHz, ±25%, 1.1Ω, SMD 0402; Manufacturer: Sunlord; Manufacturer Part Number: SZ1005K601CTF; Package Size: 0402; JLCPCB Basic Part: No; JLCPCB Part Number: C316346; Supplier 1: LCSC; Category: Ferrite Beads; Supplier Part Number 1: C316346; Tolerance: ±25%; DC Resistance: 1.1Ω; RoHS: Yes; ComponentLink1Description: Datasheet; ComponentLink1URL: https://wmsc.lcsc.com/wmsc/upload/file/pdf/v2/lcsc/2310301641_Sunlord-SZ1005K601CTF_C316346.pdf; ComponentLink2Description: JLCPCB Part URL; ComponentLink2URL: https://jlcpcb.com/partdetail/C316346; ComponentLink3Description: LCSC Part URL; ComponentLink3URL: https://lcsc.com/product-detail/Ferrite-Beads_Sunlord-Sunlord-SZ1005K601CTF_C316346.html
footprint FB-0402 (0402 (1005M) Ferrite)
pins: 1, 2

## SZ1005K601TF
designator FB?  Impedance @ Frequency: 600Ω@100MHz
Ferrite, 600Ω@100MHz, ±25%, 1.1Ω, 100mA, SMD 0402; Manufacturer: Sunlord; Manufacturer Part Number: SZ1005K601TF; Package Size: 0402; JLCPCB Basic Part: No; JLCPCB Part Number: C316345; Supplier 1: LCSC; Category: Ferrite Beads; Supplier Part Number 1: C316345; Tolerance: ±25%; Rated Current: 100mA; DC Resistance: 1.1Ω; RoHS: Yes; ComponentLink1Description: Datasheet; ComponentLink1URL: https://wmsc.lcsc.com/wmsc/upload/file/pdf/v2/lcsc/2310301641_Sunlord-SZ1005K601TF_C316345.pdf; ComponentLink2Description: JLCPCB Part URL; ComponentLink2URL: https://jlcpcb.com/partdetail/C316345; ComponentLink3Description: LCSC Part URL; ComponentLink3URL: https://lcsc.com/product-detail/Ferrite-Beads_Sunlord-Sunlord-SZ1005K601TF_C316345.html
footprint FB-0402 (0402 (1005M) Ferrite)
pins: 1, 2

## SZ1005K750CTF
designator FB?  Impedance @ Frequency: 75Ω@100MHz
Ferrite, 75Ω@100MHz, ±25%, 300mΩ, SMD 0402; Manufacturer: Sunlord; Manufacturer Part Number: SZ1005K750CTF; Package Size: 0402; JLCPCB Basic Part: No; JLCPCB Part Number: C370548; Supplier 1: LCSC; Category: Ferrite Beads; Supplier Part Number 1: C370548; Tolerance: ±25%; DC Resistance: 300mΩ; RoHS: Yes; ComponentLink1Description: Datasheet; ComponentLink1URL: https://wmsc.lcsc.com/wmsc/upload/file/pdf/v2/lcsc/2310301641_Sunlord-SZ1005K750CTF_C370548.pdf; ComponentLink2Description: JLCPCB Part URL; ComponentLink2URL: https://jlcpcb.com/partdetail/C370548; ComponentLink3Description: LCSC Part URL; ComponentLink3URL: https://lcsc.com/product-detail/Ferrite-Beads_Sunlord-Sunlord-SZ1005K750CTF_C370548.html
footprint FB-0402 (0402 (1005M) Ferrite)
pins: 1, 2

## SZ1005K750TF
designator FB?  Impedance @ Frequency: 75Ω@100MHz
Ferrite, 75Ω@100MHz, ±25%, 300mΩ, 600mA, SMD 0402; Manufacturer: Sunlord; Manufacturer Part Number: SZ1005K750TF; Package Size: 0402; JLCPCB Basic Part: No; JLCPCB Part Number: C96985; Supplier 1: LCSC; Category: Ferrite Beads; Supplier Part Number 1: C96985; Tolerance: ±25%; Rated Current: 600mA; DC Resistance: 300mΩ; RoHS: Yes; ComponentLink1Description: Datasheet; ComponentLink1URL: https://wmsc.lcsc.com/wmsc/upload/file/pdf/v2/lcsc/2310301641_Sunlord-SZ1005K750TF_C96985.pdf; ComponentLink2Description: JLCPCB Part URL; ComponentLink2URL: https://jlcpcb.com/partdetail/C96985; ComponentLink3Description: LCSC Part URL; ComponentLink3URL: https://lcsc.com/product-detail/Ferrite-Beads_Sunlord-Sunlord-SZ1005K750TF_C96985.html
footprint FB-0402 (0402 (1005M) Ferrite)
pins: 1, 2

## TL1105AF160Q
designator S?
Tactile Switch SPST-NO Top Actuated Through Hole; MF: E-Switch; MP: TL1105AF160Q; SnapEDA_Link: https://www.snapeda.com/parts/TL1105AF160Q/E-Switch/view-part/?ref=snap; Package: None; Value: *; Check_prices: https://www.snapeda.com/parts/TL1105AF160Q/E-Switch/view-part/?ref=eda
footprint TL1105AF160Q
pins: 1, 3

## TYPE-C-31-M-12
designator J?
USB Connectors 24 Receptacle 1 8.94*7.3mm RoHS; MF: HRO Electronics Co., Ltd.; MP: TYPE-C-31-M-12; SnapEDA_Link: https://www.snapeda.com/parts/TYPE-C-31-M-12/HRO+Electronics+Co.%252C+Ltd./view-part/?ref=snap; Package: Package; Value: *; Check_prices: https://www.snapeda.com/parts/TYPE-C-31-M-12/HRO+Electronics+Co.%252C+Ltd./view-part/?ref=eda
footprint HRO_TYPE-C-31-M-12
pins: A1_B12 GND (power), A4_B9 VBUS (power), A5 CC1 (io), A6 DP1 (io), A7 DN1 (io), A8 SBU1 (io), B1_A12 GND (power), B4_A9 VBUS (power), B5 CC2 (io), B6 DP2 (io), B7 DN2 (io), B8 SBU2 (io), S1 SHIELD, S2 SHIELD, S3 SHIELD, S4 SHIELD

## UPB1005-121_1A3
designator FB?  Impedance @ Frequency: 120Ω@100MHz
Ferrite, 120Ω@100MHz, ±25%, 120mΩ, 1.3A, SMD 0402; Manufacturer: CEC(Shenzhen Zhenhua Fu Elec); Manufacturer Part Number: UPB1005-121/1A3; Package Size: 0402; JLCPCB Basic Part: No; JLCPCB Part Number: C2982969; Supplier 1: LCSC; Category: Ferrite Beads; Supplier Part Number 1: C2982969; Tolerance: ±25%; Rated Current: 1.3A; DC Resistance: 120mΩ; RoHS: Yes; ComponentLink1Description: Datasheet; ComponentLink2Description: JLCPCB Part URL; ComponentLink2URL: https://jlcpcb.com/partdetail/C2982969; ComponentLink3Description: LCSC Part URL; ComponentLink3URL: https://lcsc.com/product-detail/Ferrite-Beads_CECShenzhen-Zhenhua-Fu-Elec-CECShenzhen-Zhenhua-Fu-Elec-UPB1005-121-1A3_C2982969.html
footprint FB-0402 (0402 (1005M) Ferrite)
pins: 1, 2

## UPB100505T-121Y-N
designator FB?  Impedance @ Frequency: 120Ω@100MHz
Ferrite, 120Ω@100MHz, ±25%, 0.055Ω, 2000mA, SMD 0402; Manufacturer: Chilisin Elec; Manufacturer Part Number: UPB100505T-121Y-N; Package Size: 0402; JLCPCB Basic Part: No; JLCPCB Part Number: C285596; Supplier 1: LCSC; Category: Ferrite Beads; Supplier Part Number 1: C285596; Tolerance: ±25%; Rated Current: 2000mA; DC Resistance: 0.055Ω; RoHS: Yes; ComponentLink1Description: Datasheet; ComponentLink1URL: https://wmsc.lcsc.com/wmsc/upload/file/pdf/v2/lcsc/2304140030_Chilisin-Elec-UPB100505T-121Y-N_C285596.pdf; ComponentLink2Description: JLCPCB Part URL; ComponentLink2URL: https://jlcpcb.com/partdetail/C285596; ComponentLink3Description: LCSC Part URL; ComponentLink3URL: https://lcsc.com/product-detail/Ferrite-Beads_Chilisin-Elec-Chilisin-Elec-UPB100505T-121Y-N_C285596.html
footprint FB-0402 (0402 (1005M) Ferrite)
pins: 1, 2

## UPB100505T-221Y-N
designator FB?  Impedance @ Frequency: 220Ω@100MHz
Ferrite, 220Ω@100MHz, ±25%, 0.1Ω, 1400mA, SMD 0402; Manufacturer: Chilisin Elec; Manufacturer Part Number: UPB100505T-221Y-N; Package Size: 0402; JLCPCB Basic Part: No; JLCPCB Part Number: C108316; Supplier 1: LCSC; Category: Ferrite Beads; Supplier Part Number 1: C108316; Tolerance: ±25%; Rated Current: 1400mA; DC Resistance: 0.1Ω; RoHS: Yes; ComponentLink1Description: Datasheet; ComponentLink1URL: https://wmsc.lcsc.com/wmsc/upload/file/pdf/v2/lcsc/2304140030_Chilisin-Elec-UPB100505T-221Y-N_C108316.pdf; ComponentLink2Description: JLCPCB Part URL; ComponentLink2URL: https://jlcpcb.com/partdetail/C108316; ComponentLink3Description: LCSC Part URL; ComponentLink3URL: https://lcsc.com/product-detail/Ferrite-Beads_Chilisin-Elec-Chilisin-Elec-UPB100505T-221Y-N_C108316.html
footprint FB-0402 (0402 (1005M) Ferrite)
pins: 1, 2

## UPZ1005D100-2R0TF
designator FB?  Impedance @ Frequency: 10Ω@100MHz
Ferrite, 10Ω@100MHz, 45mΩ, 2A, SMD 0402; Manufacturer: Sunlord; Manufacturer Part Number: UPZ1005D100-2R0TF; Package Size: 0402; JLCPCB Basic Part: No; JLCPCB Part Number: C370568; Supplier 1: LCSC; Category: Ferrite Beads; Supplier Part Number 1: C370568; Rated Current: 2A; DC Resistance: 45mΩ; RoHS: Yes; ComponentLink1Description: Datasheet; ComponentLink1URL: https://wmsc.lcsc.com/wmsc/upload/file/pdf/v2/lcsc/2310301641_Sunlord-UPZ1005D100-2R0TF_C370568.pdf; ComponentLink2Description: JLCPCB Part URL; ComponentLink2URL: https://jlcpcb.com/partdetail/C370568; ComponentLink3Description: LCSC Part URL; ComponentLink3URL: https://lcsc.com/product-detail/Ferrite-Beads_Sunlord-Sunlord-UPZ1005D100-2R0TF_C370568.html
footprint FB-0402 (0402 (1005M) Ferrite)
pins: 1, 2

## UPZ1005D121-1R3TF
designator FB?  Impedance @ Frequency: 120Ω@100MHz
Ferrite, 120Ω@100MHz, ±25%, 90mΩ, 1.3A, SMD 0402; Manufacturer: Sunlord; Manufacturer Part Number: UPZ1005D121-1R3TF; Package Size: 0402; JLCPCB Basic Part: No; JLCPCB Part Number: C96993; Supplier 1: LCSC; Category: Ferrite Beads; Supplier Part Number 1: C96993; Tolerance: ±25%; Rated Current: 1.3A; DC Resistance: 90mΩ; RoHS: Yes; ComponentLink1Description: Datasheet; ComponentLink1URL: https://wmsc.lcsc.com/wmsc/upload/file/pdf/v2/lcsc/2310301641_Sunlord-UPZ1005D121-1R3TF_C96993.pdf; ComponentLink2Description: JLCPCB Part URL; ComponentLink2URL: https://jlcpcb.com/partdetail/C96993; ComponentLink3Description: LCSC Part URL; ComponentLink3URL: https://lcsc.com/product-detail/Ferrite-Beads_Sunlord-Sunlord-UPZ1005D121-1R3TF_C96993.html
footprint FB-0402 (0402 (1005M) Ferrite)
pins: 1, 2

## UPZ1005D221-R90TF
designator FB?  Impedance @ Frequency: 220Ω@100MHz
Ferrite, 220Ω@100MHz, ±25%, 160mΩ, 0.9A, SMD 0402; Manufacturer: Sunlord; Manufacturer Part Number: UPZ1005D221-R90TF; Package Size: 0402; JLCPCB Basic Part: No; JLCPCB Part Number: C96994; Supplier 1: LCSC; Category: Ferrite Beads; Supplier Part Number 1: C96994; Tolerance: ±25%; Rated Current: 0.9A; DC Resistance: 160mΩ; RoHS: Yes; ComponentLink1Description: Datasheet; ComponentLink1URL: https://wmsc.lcsc.com/wmsc/upload/file/pdf/v2/lcsc/2310301641_Sunlord-UPZ1005D221-R90TF_C96994.pdf; ComponentLink2Description: JLCPCB Part URL; ComponentLink2URL: https://jlcpcb.com/partdetail/C96994; ComponentLink3Description: LCSC Part URL; ComponentLink3URL: https://lcsc.com/product-detail/Ferrite-Beads_Sunlord-Sunlord-UPZ1005D221-R90TF_C96994.html
footprint FB-0402 (0402 (1005M) Ferrite)
pins: 1, 2

## UPZ1005D300-2R0TF
designator FB?  Impedance @ Frequency: 30Ω@100MHz
Ferrite, 30Ω@100MHz, ±25%, 2A, SMD 0402; Manufacturer: Sunlord; Manufacturer Part Number: UPZ1005D300-2R0TF; Package Size: 0402; JLCPCB Basic Part: No; JLCPCB Part Number: C305247; Supplier 1: LCSC; Category: Ferrite Beads; Supplier Part Number 1: C305247; Tolerance: ±25%; Rated Current: 2A; RoHS: Yes; ComponentLink1Description: Datasheet; ComponentLink1URL: https://wmsc.lcsc.com/wmsc/upload/file/pdf/v2/lcsc/2310301641_Sunlord-UPZ1005D300-2R0TF_C305247.pdf; ComponentLink2Description: JLCPCB Part URL; ComponentLink2URL: https://jlcpcb.com/partdetail/C305247; ComponentLink3Description: LCSC Part URL; ComponentLink3URL: https://lcsc.com/product-detail/Ferrite-Beads_Sunlord-Sunlord-UPZ1005D300-2R0TF_C305247.html
footprint FB-0402 (0402 (1005M) Ferrite)
pins: 1, 2

## UPZ1005D300-2R2TF
designator FB?  Impedance @ Frequency: 30Ω@100MHz
Ferrite, 30Ω@100MHz, ±25%, 35mΩ, 2.2A, SMD 0402; Manufacturer: Sunlord; Manufacturer Part Number: UPZ1005D300-2R2TF; Package Size: 0402; JLCPCB Basic Part: No; JLCPCB Part Number: C98299; Supplier 1: LCSC; Category: Ferrite Beads; Supplier Part Number 1: C98299; Tolerance: ±25%; Rated Current: 2.2A; DC Resistance: 35mΩ; RoHS: Yes; ComponentLink1Description: Datasheet; ComponentLink1URL: https://wmsc.lcsc.com/wmsc/upload/file/pdf/v2/lcsc/2310301641_Sunlord-UPZ1005D300-2R2TF_C98299.pdf; ComponentLink2Description: JLCPCB Part URL; ComponentLink2URL: https://jlcpcb.com/partdetail/C98299; ComponentLink3Description: LCSC Part URL; ComponentLink3URL: https://lcsc.com/product-detail/Ferrite-Beads_Sunlord-Sunlord-UPZ1005D300-2R2TF_C98299.html
footprint FB-0402 (0402 (1005M) Ferrite)
pins: 1, 2

## UPZ1005D600-1R5TF
designator FB?  Impedance @ Frequency: 60Ω@100MHz
Ferrite, 60Ω@100MHz, ±25%, 75mΩ, 1.5A, SMD 0402; Manufacturer: Sunlord; Manufacturer Part Number: UPZ1005D600-1R5TF; Package Size: 0402; JLCPCB Basic Part: No; JLCPCB Part Number: C98300; Supplier 1: LCSC; Category: Ferrite Beads; Supplier Part Number 1: C98300; Tolerance: ±25%; Rated Current: 1.5A; DC Resistance: 75mΩ; RoHS: Yes; ComponentLink1Description: Datasheet; ComponentLink1URL: https://wmsc.lcsc.com/wmsc/upload/file/pdf/v2/lcsc/2310301641_Sunlord-UPZ1005D600-1R5TF_C98300.pdf; ComponentLink2Description: JLCPCB Part URL; ComponentLink2URL: https://jlcpcb.com/partdetail/C98300; ComponentLink3Description: LCSC Part URL; ComponentLink3URL: https://lcsc.com/product-detail/Ferrite-Beads_Sunlord-Sunlord-UPZ1005D600-1R5TF_C98300.html
footprint FB-0402 (0402 (1005M) Ferrite)
pins: 1, 2

## UPZ1005D800-1R5TF
designator FB?  Impedance @ Frequency: 80Ω@100MHz
Ferrite, 80Ω@100MHz, ±25%, 70mΩ, 1.5A, SMD 0402; Manufacturer: Sunlord; Manufacturer Part Number: UPZ1005D800-1R5TF; Package Size: 0402; JLCPCB Basic Part: No; JLCPCB Part Number: C185901; Supplier 1: LCSC; Category: Ferrite Beads; Supplier Part Number 1: C185901; Tolerance: ±25%; Rated Current: 1.5A; DC Resistance: 70mΩ; RoHS: Yes; ComponentLink1Description: Datasheet; ComponentLink1URL: https://wmsc.lcsc.com/wmsc/upload/file/pdf/v2/lcsc/2310301641_Sunlord-UPZ1005D800-1R5TF_C185901.pdf; ComponentLink2Description: JLCPCB Part URL; ComponentLink2URL: https://jlcpcb.com/partdetail/C185901; ComponentLink3Description: LCSC Part URL; ComponentLink3URL: https://lcsc.com/product-detail/Ferrite-Beads_Sunlord-Sunlord-UPZ1005D800-1R5TF_C185901.html
footprint FB-0402 (0402 (1005M) Ferrite)
pins: 1, 2

## USBLC6-2SC6
designator U?
17V Clamp 5A (8/20Âµs) Ipp Tvs Diode Surface Mount SOT-23-6; MF: STMicroelectronics; MP: USBLC6-2SC6; Value: *; SnapEDA_Link: https://www.snapeda.com/parts/USBLC6-2SC6/STMicroelectronics/view-part/?ref=snap; Check_prices: https://www.snapeda.com/parts/USBLC6-2SC6/STMicroelectronics/view-part/?ref=eda; Purchase-URL: https://pricing.snapeda.com/search/part/USBLC6-2SC6/?ref=eda; Price: None; Availability: In Stock; Package: SOT-23-6 STMicroelectronics
footprint SOT95P280X145-6N
pins: 1 I/O1_IN (io), 2 GND (power), 3 I/O2_IN (io), 4 I/O2_OUT (io), 5 VBUS (power), 6 I/O1_OUT (io)

## X322516MLB4SI
designator Y?, comment 16MHz
-40℃~+85℃ 16MHz 50Ω 10pF Crystal Oscillator ±10ppm ±20ppm SMD3225-4P Crystals ROHS; MF: YXC; MP: X322516MLB4SI; SnapEDA_Link: https://www.snapeda.com/parts/X322516MLB4SI/YXC/view-part/?ref=snap; Package: Package; Value: *; Check_prices: https://www.snapeda.com/parts/X322516MLB4SI/YXC/view-part/?ref=eda
footprint OSC_X322516MLB4SI
pins: 1, 2 GND (power), 3, 4 GND (power)